# Altium footprint library IC-QFN.PcbLib: 94 footprints (part 1 of 6)
Each footprint in its own frame and in the unit in brackets; x right, y up, seen from the top. Pads: shape width x height; smd on the part's side, far side on the other; paste and mask are expansions set on the pad; w line width, h text height; cw(c..) or ccw(c..) is an arc to the next point about the centre after c.
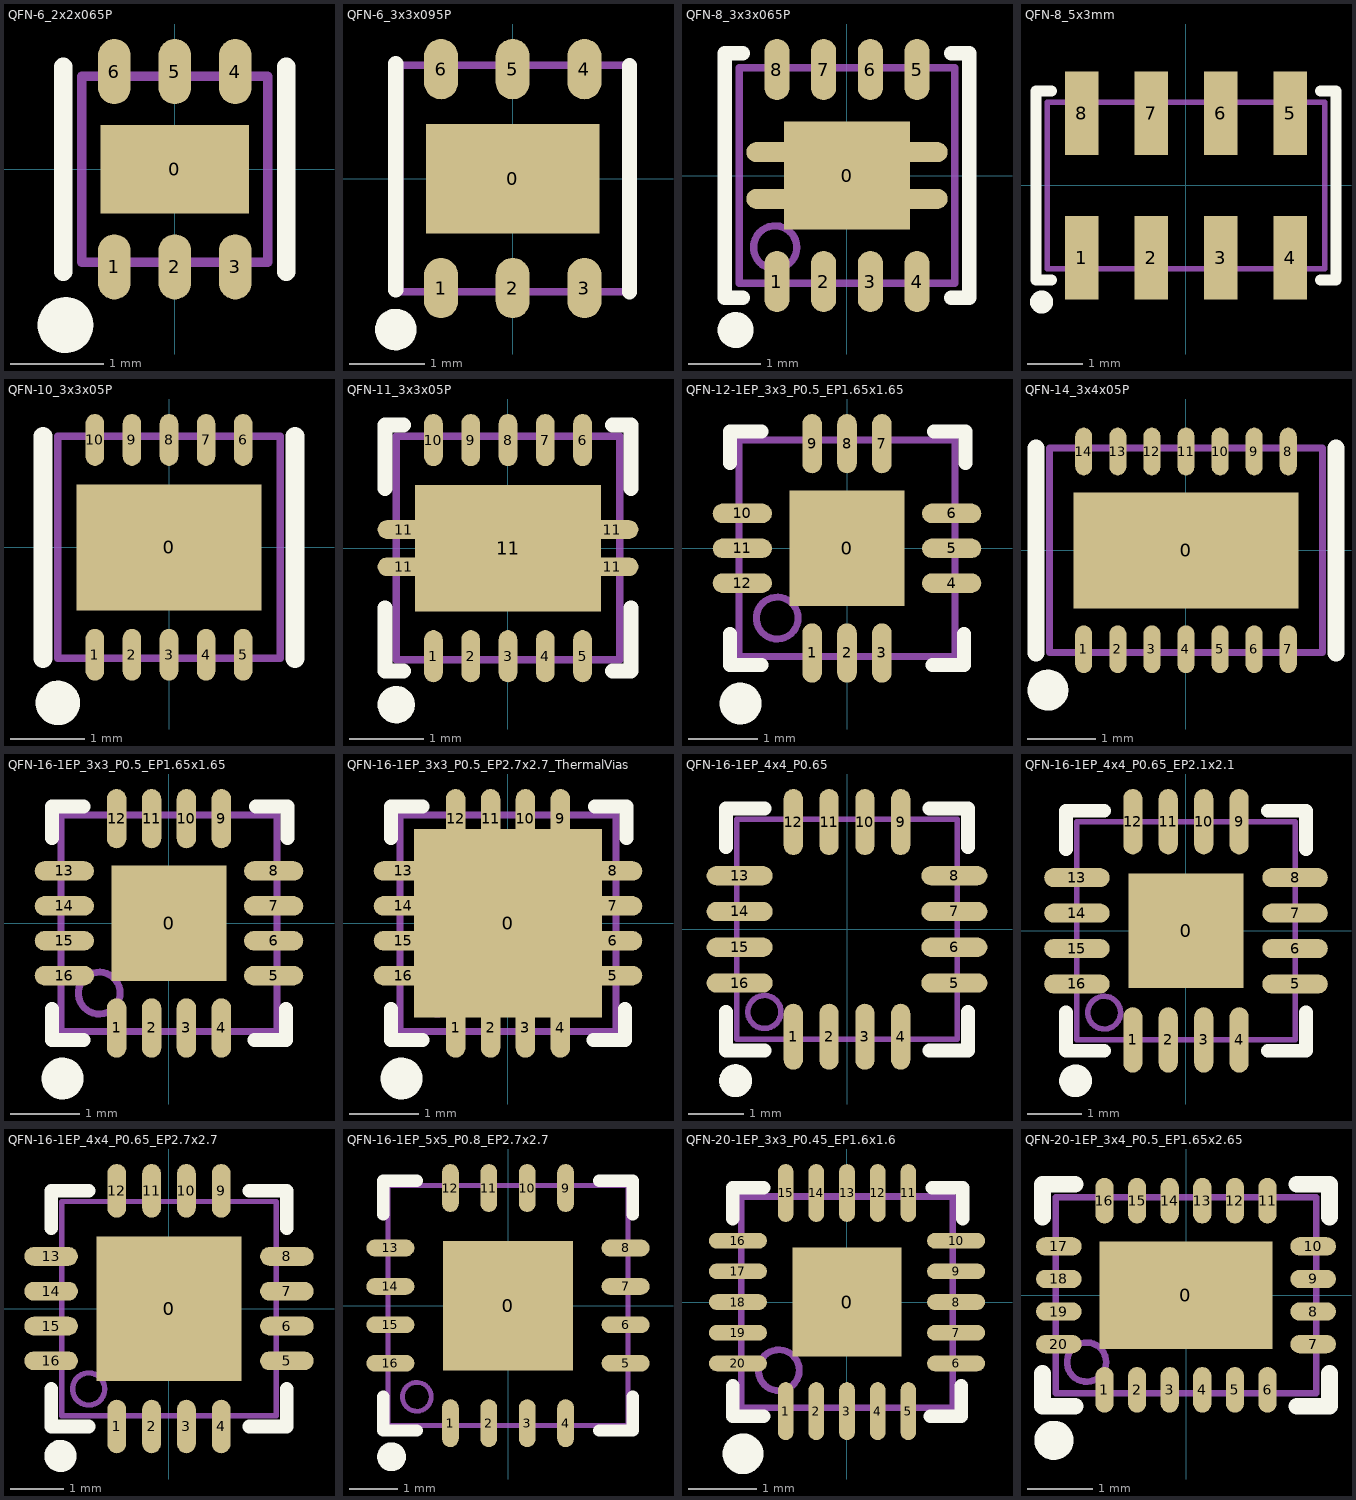
[diagram p0: the footprints below, top view; thin cyan lines are the x and y axes]

## QFN-6_2x2x065P [mm]
pads (7):
  rect 1.6x0.95 smd mask+0.051: 0(0,0)
  oval 0.35x0.7 smd mask+0.051: 1(-0.65,-1.05) 2(0,-1.05) 3(0.65,-1.05) 4(0.65,1.05) 5(0,1.05) 6(-0.65,1.05)
Top Overlay:
  circle w0.3: c-1.175,-1.675 r0.15
  lines w0.2: -1.2,-1.1 -1.2,1.1 ; 1.2,-1.1 1.2,1.1
Mechanical 13:
  lines w0.1: -1,-1 -1,1 1,1 1,-1 -1,-1

## QFN-6_3x3x095P [mm]
pads (7):
  rect 2.3x1.45 smd: 0(0,0)
  oval 0.45x0.8 smd: 1(-0.95,-1.45) 2(0,-1.45) 3(0.95,-1.45) 4(0.95,1.45) 5(0,1.45) 6(-0.95,1.45)
Top Overlay:
  circle w0.3: c-1.55,-2 r0.125
  lines w0.2: -1.55,-1.475 -1.55,1.525 ; 1.55,-1.5 1.55,1.5
Mechanical 13:
  lines w0.1: -1.5,-1.5 -1.5,1.5 1.5,1.5 1.5,-1.5 -1.5,-1.5

## QFN-8_3x3x065P [mm]
pads (11):
  rect 1.75x1.5 smd: 0(0,0)
  oval 0.35x0.85 smd: 1(-0.975,-1.475) 2(-0.325,-1.475) 3(0.325,-1.475) 4(0.975,-1.475) 5(0.975,1.475) 6(0.325,1.475) 7(-0.325,1.475) 8(-0.975,1.475)
  oval 2.8x0.28 smd: ""(0,-0.325) ""(0,0.325)
Top Overlay:
  circle w0.25: c-1.55,-2.15 r0.125
  lines w0.2: -1.45,-1.7 -1.7,-1.7 -1.7,1.7 -1.45,1.7 ; 1.45,-1.7 1.7,-1.7 1.7,1.7 1.45,1.7
Mechanical 13:
  circle w0.1: c-1,-1 r0.3
  lines w0.1: -1.5,-1.5 -1.5,1.5 1.5,1.5 1.5,-1.5 -1.5,-1.5

## QFN-8_5x3mm [mm]
pads (8):
  rect 0.6x1.5 smd: 1(-1.875,-1.3) 2(-0.625,-1.3) 3(0.625,-1.3) 4(1.875,-1.3) 5(1.875,1.3) 6(0.625,1.3) 7(-0.625,1.3) 8(-1.875,1.3)
Top Overlay:
  circle w0.254: c-2.6,-2.1 r0.08
  lines w0.2: -2.425,-1.7 -2.7,-1.7 -2.7,1.7 -2.425,1.7 ; 2.425,-1.7 2.7,-1.7 2.7,1.7 2.425,1.7
Mechanical 13:
  lines w0.1: -2.5,-1.5 2.5,-1.5 2.5,1.5 -2.5,1.5 -2.5,-1.5

## QFN-10_3x3x05P [mm]
pads (11):
  rect 2.5x1.7 smd mask+0.051: 0(0,0)
  oval 0.25x0.7 smd mask+0.051: 1(-1,-1.45) 2(-0.5,-1.45) 3(0,-1.45) 4(0.5,-1.45) 5(1,-1.45) 6(1,1.45) 7(0.5,1.45) 8(0,1.45) 9(-0.5,1.45) 10(-1,1.45)
Top Overlay:
  circle w0.3: c-1.5,-2.1 r0.15
  lines w0.254: -1.7,-1.5 -1.7,1.5 ; 1.7,-1.5 1.7,1.5
Mechanical 13:
  lines w0.1: -1.5,-1.5 -1.5,1.5 1.5,1.5 1.5,-1.5 -1.5,-1.5

## QFN-11_3x3x05P [mm]
pads (15):
  oval 0.25x0.7 smd mask+0.051: 1(-1,-1.45) 2(-0.5,-1.45) 3(0,-1.45) 4(0.5,-1.45) 5(1,-1.45) 6(1,1.45) 7(0.5,1.45) 8(0,1.45) 9(-0.5,1.45) 10(-1,1.45)
  oval 0.7x0.25 smd mask+0.051: 11(-1.4,-0.25) 11(-1.4,0.25) 11(1.4,-0.25) 11(1.4,0.25)
  rect 2.5x1.7 smd mask+0.051: 11(0,0)
Top Overlay:
  circle w0.25: c-1.5,-2.1 r0.125
  lines w0.2: -1.65,-0.8 -1.65,-1.65 -1.4,-1.65 ; -1.65,0.8 -1.65,1.65 -1.4,1.65 ; 1.4,-1.65 1.65,-1.65 1.65,-0.8 ; 1.4,1.65 1.65,1.65 1.65,0.8
Mechanical 13:
  lines w0.1: -1.5,-1.5 1.5,-1.5 1.5,1.5 -1.5,1.5 -1.5,-1.5

## QFN-12-1EP_3x3_P0.5_EP1.65x1.65 [mm]
pads (13):
  rect 1.65x1.65 smd mask+0.051: 0(0,0)
  oval 0.28x0.85 smd mask+0.051: 1(-0.5,-1.5) 2(0,-1.5) 3(0.5,-1.5) 7(0.5,1.5) 8(0,1.5) 9(-0.5,1.5)
  oval 0.85x0.28 smd mask+0.051: 4(1.5,-0.5) 5(1.5,0) 6(1.5,0.5) 10(-1.5,0.5) 11(-1.5,0) 12(-1.5,-0.5)
Top Overlay:
  circle w0.3: c-1.525,-2.225 r0.15
  lines w0.2: -1.675,-1.225 -1.675,-1.675 -1.225,-1.675 ; -1.675,1.225 -1.675,1.675 -1.225,1.675 ; 1.225,-1.675 1.675,-1.675 1.675,-1.225 ; 1.25,1.675 1.7,1.675 1.7,1.225
Mechanical 13:
  circle w0.1: c-1,-1 r0.3
  lines w0.1: -1.55,-1.55 -1.55,1.55 1.55,1.55 1.55,-1.55 -1.55,-1.55
3D body "QFN-12-1EP_3x3mm_P0.5mm_EP1.65x1.65mm.step": height 0.77, standoff 0, extent -1.5,-1.5 1.5,1.5

## QFN-14_3x4x05P [mm]
pads (15):
  rect 3.3x1.7 smd mask+0.051: 0(0,0)
  oval 0.25x0.7 smd mask+0.051: 1(-1.5,-1.45) 2(-1,-1.45) 3(-0.5,-1.45) 4(0,-1.45) 5(0.5,-1.45) 6(1,-1.45) 7(1.5,-1.45) 8(1.5,1.45) 9(1,1.45) 10(0.5,1.45) 11(0,1.45) 12(-0.5,1.45) 13(-1,1.45) 14(-1.5,1.45)
Top Overlay:
  circle w0.3: c-2.025,-2.05 r0.15
  lines w0.254: -2.2,-1.5 -2.2,1.5 ; 2.2,-1.5 2.2,1.5
Mechanical 13:
  lines w0.1: -2,-1.5 2,-1.5 2,1.5 -2,1.5 -2,-1.5

## QFN-16-1EP_3x3_P0.5_EP1.65x1.65 [mm]
pads (17):
  rect 1.65x1.65 smd mask+0.051: 0(0,0)
  oval 0.28x0.85 smd mask+0.051: 1(-0.75,-1.5) 2(-0.25,-1.5) 3(0.25,-1.5) 4(0.75,-1.5) 9(0.75,1.5) 10(0.25,1.5) 11(-0.25,1.5) 12(-0.75,1.5)
  oval 0.85x0.28 smd mask+0.051: 5(1.5,-0.75) 6(1.5,-0.25) 7(1.5,0.25) 8(1.5,0.75) 13(-1.5,0.75) 14(-1.5,0.25) 15(-1.5,-0.25) 16(-1.5,-0.75)
Top Overlay:
  circle w0.3: c-1.525,-2.225 r0.15
  lines w0.2: -1.675,-1.225 -1.675,-1.675 -1.225,-1.675 ; -1.675,1.225 -1.675,1.675 -1.225,1.675 ; 1.225,-1.675 1.675,-1.675 1.675,-1.225 ; 1.25,1.675 1.7,1.675 1.7,1.225
Mechanical 13:
  circle w0.1: c-1,-1 r0.3
  lines w0.1: -1.55,-1.55 1.55,-1.55 1.55,1.55 -1.55,1.55 -1.55,-1.55
3D body "QFN-16-1EP_3x3mm_P0.5mm_EP1.8x1.8mm.step": height 0.77, standoff 0, extent -1.5,-1.5 1.5,1.5

## QFN-16-1EP_3x3_P0.5_EP2.7x2.7_ThermalVias [mm]
pads (17):
  rect 2.7x2.7 smd mask+0.051: 0(0,0)
  oval 0.28x0.85 smd mask+0.051: 1(-0.75,-1.5) 2(-0.25,-1.5) 3(0.25,-1.5) 4(0.75,-1.5) 9(0.75,1.5) 10(0.25,1.5) 11(-0.25,1.5) 12(-0.75,1.5)
  oval 0.85x0.28 smd mask+0.051: 5(1.5,-0.75) 6(1.5,-0.25) 7(1.5,0.25) 8(1.5,0.75) 13(-1.5,0.75) 14(-1.5,0.25) 15(-1.5,-0.25) 16(-1.5,-0.75)
Top Overlay:
  circle w0.3: c-1.525,-2.225 r0.15
  lines w0.2: -1.675,-1.225 -1.675,-1.675 -1.225,-1.675 ; -1.675,1.225 -1.675,1.675 -1.225,1.675 ; 1.225,-1.675 1.675,-1.675 1.675,-1.225 ; 1.25,1.675 1.7,1.675 1.7,1.225
Mechanical 13:
  circle w0.1: c-1,-1 r0.3
  lines w0.1: -1.55,-1.55 -1.55,1.55 1.55,1.55 1.55,-1.55 -1.55,-1.55
3D body "QFN-16-1EP_3x3mm_P0.5mm_EP2.7x2.7mm_ThermalVias.step": height 0.6, standoff 0, extent -1.5,-1.5 1.5,1.5

## QFN-16-1EP_4x4_P0.65 [mm]
pads (16):
  oval 0.35x1.2 smd mask+0.051: 1(-0.975,-1.95) 2(-0.325,-1.95) 3(0.325,-1.95) 4(0.975,-1.95) 9(0.975,1.95) 10(0.325,1.95) 11(-0.325,1.95) 12(-0.975,1.95)
  oval 1.2x0.35 smd mask+0.051: 5(1.95,-0.975) 6(1.95,-0.325) 7(1.95,0.325) 8(1.95,0.975) 13(-1.95,0.975) 14(-1.95,0.325) 15(-1.95,-0.325) 16(-1.95,-0.975)
Top Overlay:
  circle w0.3: c-2.025,-2.75 r0.15
  lines w0.254: -2.2,-1.5 -2.2,-2.2 -1.5,-2.2 ; -2.2,1.5 -2.2,2.2 -1.5,2.2 ; 1.5,-2.2 2.2,-2.2 2.2,-1.5 ; 1.5,2.2 2.2,2.2 2.2,1.5
Mechanical 13:
  circle w0.1: c-1.5,-1.5 r0.3
  lines w0.1: -2,-2 2,-2 2,2 -2,2 -2,-2
3D body "QFN-16-1EP_4x4mm_Pitch0.65mm.step": height 1.1, standoff 0, extent -2,-2 2,2

## QFN-16-1EP_4x4_P0.65_EP2.1x2.1 [mm]
pads (17):
  rect 2.1x2.1 smd mask+0.051: 0(0,0)
  oval 0.35x1.2 smd mask+0.051: 1(-0.975,-2) 2(-0.325,-2) 3(0.325,-2) 4(0.975,-2) 9(0.975,2) 10(0.325,2) 11(-0.325,2) 12(-0.975,2)
  oval 1.2x0.35 smd mask+0.051: 5(2,-0.975) 6(2,-0.325) 7(2,0.325) 8(2,0.975) 13(-2,0.975) 14(-2,0.325) 15(-2,-0.325) 16(-2,-0.975)
Top Overlay:
  circle w0.3: c-2.025,-2.75 r0.15
  lines w0.254: -2.2,-1.5 -2.2,-2.2 -1.5,-2.2 ; -2.2,1.5 -2.2,2.2 -1.5,2.2 ; 1.5,-2.2 2.2,-2.2 2.2,-1.5 ; 1.5,2.2 2.2,2.2 2.2,1.5
Mechanical 13:
  circle w0.1: c-1.5,-1.5 r0.3
  lines w0.1: -2,-2 2,-2 2,2 -2,2 -2,-2
3D body "QFN-16-1EP_4x4mm_P0.65mm_EP2.1x2.1mm.step": height 1.1, standoff 0, extent -2,-2 2,2

## QFN-16-1EP_4x4_P0.65_EP2.7x2.7 [mm]
pads (17):
  rect 2.7x2.7 smd mask+0.051: 0(0,0)
  oval 0.35x1 smd mask+0.051: 1(-0.975,-2.2) 2(-0.325,-2.2) 3(0.325,-2.2) 4(0.975,-2.2) 9(0.975,2.2) 10(0.325,2.2) 11(-0.325,2.2) 12(-0.975,2.2)
  oval 1x0.35 smd mask+0.051: 5(2.2,-0.975) 6(2.2,-0.325) 7(2.2,0.325) 8(2.2,0.975) 13(-2.2,0.975) 14(-2.2,0.325) 15(-2.2,-0.325) 16(-2.2,-0.975)
Top Overlay:
  circle w0.3: c-2.025,-2.75 r0.15
  lines w0.254: -2.2,-1.5 -2.2,-2.2 -1.5,-2.2 ; -2.2,1.5 -2.2,2.2 -1.5,2.2 ; 1.5,-2.2 2.2,-2.2 2.2,-1.5 ; 1.5,2.2 2.2,2.2 2.2,1.5
Mechanical 13:
  circle w0.1: c-1.5,-1.5 r0.3
  lines w0.1: -2,-2 -2,2 2,2 2,-2 -2,-2
3D body "QFN-16-1EP_4x4mm_P0.65mm_EP2.7x2.7mm.step": height 1.1, standoff 0, extent -2,-2 1.999,2

## QFN-16-1EP_5x5_P0.8_EP2.7x2.7 [mm]
pads (17):
  rect 2.7x2.7 smd mask+0.051: 0(0,0)
  oval 0.35x1 smd mask+0.051: 1(-1.2,-2.45) 2(-0.4,-2.45) 3(0.4,-2.45) 4(1.2,-2.45) 9(1.2,2.45) 10(0.4,2.45) 11(-0.4,2.45) 12(-1.2,2.45)
  oval 1x0.35 smd mask+0.051: 5(2.45,-1.2) 6(2.45,-0.4) 7(2.45,0.4) 8(2.45,1.2) 13(-2.45,1.2) 14(-2.45,0.4) 15(-2.45,-0.4) 16(-2.45,-1.2)
Top Overlay:
  circle w0.3: c-2.425,-3.15 r0.15
  lines w0.254: -2.6,-1.9 -2.6,-2.6 -1.9,-2.6 ; -2.6,1.9 -2.6,2.6 -1.9,2.6 ; 1.9,-2.6 2.6,-2.6 2.6,-1.9 ; 1.9,2.6 2.6,2.6 2.6,1.9
Mechanical 13:
  circle w0.1: c-1.9,-1.9 r0.3
  lines w0.1: -2.5,-2.5 -2.5,2.5 2.5,2.5 2.5,-2.5 -2.5,-2.5
3D body "QFN-16-1EP_5x5mm_P0.8mm_EP2.7x2.7mm.step": height 0.92, standoff 0, extent -2.5,-2.5 2.5,2.5

## QFN-20-1EP_3x3_P0.45_EP1.6x1.6 [mm]
pads (21):
  rect 1.6x1.6 smd mask+0.051: 0(0,0)
  oval 0.23x0.85 smd mask+0.051: 1(-0.9,-1.6) 2(-0.45,-1.6) 3(0,-1.6) 4(0.45,-1.6) 5(0.9,-1.6) 11(0.9,1.6) 12(0.45,1.6) 13(0,1.6) 14(-0.45,1.6) 15(-0.9,1.6)
  oval 0.85x0.23 smd mask+0.051: 6(1.6,-0.9) 7(1.6,-0.45) 8(1.6,0) 9(1.6,0.45) 10(1.6,0.9) 16(-1.6,0.9) 17(-1.6,0.45) 18(-1.6,0) 19(-1.6,-0.45) 20(-1.6,-0.9)
Top Overlay:
  circle w0.3: c-1.525,-2.225 r0.15
  lines w0.2: -1.675,-1.225 -1.675,-1.675 -1.225,-1.675 ; -1.675,1.225 -1.675,1.675 -1.225,1.675 ; 1.225,-1.675 1.675,-1.675 1.675,-1.225 ; 1.25,1.675 1.7,1.675 1.7,1.225
Mechanical 13:
  circle w0.1: c-1,-1 r0.3
  lines w0.1: -1.55,-1.55 -1.55,1.55 1.55,1.55 1.55,-1.55 -1.55,-1.55
3D body "QFN-20-1EP_3x3mm_P0.45mm_EP1.6x1.6mm.step": height 0.6, standoff 0, extent -1.5,-1.5 1.5,1.5

## QFN-20-1EP_3x4_P0.5_EP1.65x2.65 [mm]
pads (21):
  rect 2.65x1.65 smd mask+0.051: 0(0,0)
  oval 0.28x0.7 smd mask+0.051: 1(-1.25,-1.45) 2(-0.75,-1.45) 3(-0.25,-1.45) 4(0.25,-1.45) 5(0.75,-1.45) 6(1.25,-1.45) 11(1.25,1.45) 12(0.75,1.45) 13(0.25,1.45) 14(-0.25,1.45) 15(-0.75,1.45) 16(-1.25,1.45)
  oval 0.7x0.28 smd mask+0.051: 7(1.95,-0.75) 8(1.95,-0.25) 9(1.95,0.25) 10(1.95,0.75) 17(-1.95,0.75) 18(-1.95,0.25) 19(-1.95,-0.25) 20(-1.95,-0.75)
Top Overlay:
  circle w0.3: c-2.025,-2.225 r0.15
  lines w0.254: -2.2,-1.2 -2.2,-1.7 -1.7,-1.7 ; -2.2,1.2 -2.2,1.7 -1.7,1.7 ; 1.7,-1.7 2.2,-1.7 2.2,-1.2 ; 1.7,1.7 2.2,1.7 2.2,1.2
Mechanical 13:
  circle w0.1: c-1.525,-1.025 r0.3
  lines w0.1: -2,-1.5 2,-1.5 2,1.5 -2,1.5 -2,-1.5
3D body "QFN-20-1EP_3x4mm_P0.5mm_EP1.65x2.65mm.step": height 0.77, standoff 0, extent -2,-1.5 2,1.5